# EAGLE library part 6100XX21121_61001621121 (library WR-PHD)
WR-PHD 2.54 mm SMT Dual Pin Header ARTICLE PROPERTIES: Pins:4;​ 6;​ 8;​ 10;​ 12;​ 14;​ 16;​ 20;​ 22;​ 24;​ 26;​ 32;​ 34;​ 36 KIND PROPERTIES: Pitch：2.54 mm Quality Class:3 as per CECC 75 301-802 Rows：Dual Gender：Pin Header Type：Straight MATERIAL PROPERTIES: Insulator Material :PA6T Insulator Flammability Rating:UL94 V-0 Contact Material:Copper Alloy Contact Plating:Gold Contact Type:Stamped GENERAL INFORMATION Operating Temperature:-40 up to +125 °C Compliance:Lead free / RoHS ELECTRICAL PROPERTIES: Rated Current:3 A IR 1:3 A Withstanding Voltage:500 V (AC) Contact Resistance:20 mΩ RISO:1000 MΩ CERTIFICATION UL Approval:E323964 PACKAGING PROPERTIES Packaging:Tube <https://katalog.we-online.com/media/images/v2/o33205v209%20Family_WR-PHD_610xxx21121.jpg> Details see: https://katalog.we-online.com/en/em/PHD_2_54_SMT_DUAL_PIN_HEADER_6100XX21121 Updated by Yingchun,Shan 2019-10-18 2019 (C) Würth Elektronik
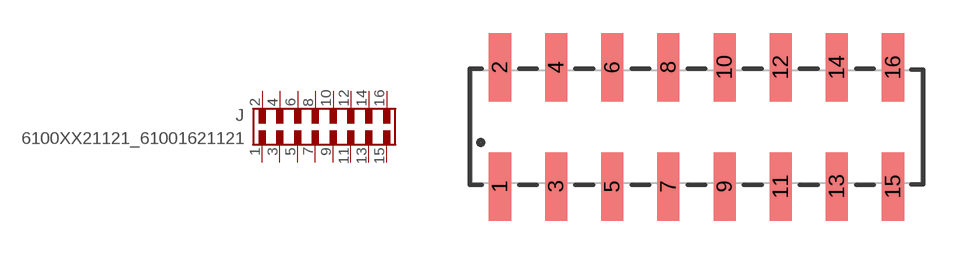
[diagram p26: symbol with the pads of 61001621121; footprint 61001621121]

Designator prefix J

## 6100XX21121_61001621121 (DATASHEET-URL: https://www.we-online.com/redexpert/spec/61001621121?ae; GENDER: Pin Header; IR: 3A; MOUNT: SMT; PACKAGING: Tube; PART-NUMBER: 61001621121; PINS: 16; PITCH: 2.54 mm; ROWS: Dual; TYPE: Straight; VALUE: 61001621121)  [61001621121]
1  1  pas
2  2  pas
3  3  pas
4  4  pas
5  5  pas
6  6  pas
7  7  pas
8  8  pas
9  9  pas
10  10  pas
11  11  pas
12  12  pas
13  13  pas
14  14  pas
15  15  pas
16  16  pas

## Footprint 61001621121 (pad centres in mm)
WR-PHD 2.54 mm SMT Dual Pin Header, 16 Pins
smd 1 x 3.1: 1 -8.89,-2.7; 2 -8.89,2.7; 3 -6.35,-2.7; 4 -6.35,2.7; 5 -3.81,-2.7; 6 -3.81,2.7; 7 -1.27,-2.7; 8 -1.27,2.7; 9 1.27,-2.7; 10 1.27,2.7; 11 3.81,-2.7; 12 3.81,2.7; 13 6.35,-2.7; 14 6.35,2.7; 15 8.89,-2.7; 16 8.89,2.7